# Altium footprint library MMSZ5246B-TP.PcbLib: 3 footprints
Each footprint in its own frame and in the unit in brackets; x right, y up, seen from the top. Pads: shape width x height; smd on the part's side, far side on the other; paste and mask are expansions set on the pad; w line width, h text height; cw(c..) or ccw(c..) is an arc to the next point about the centre after c.
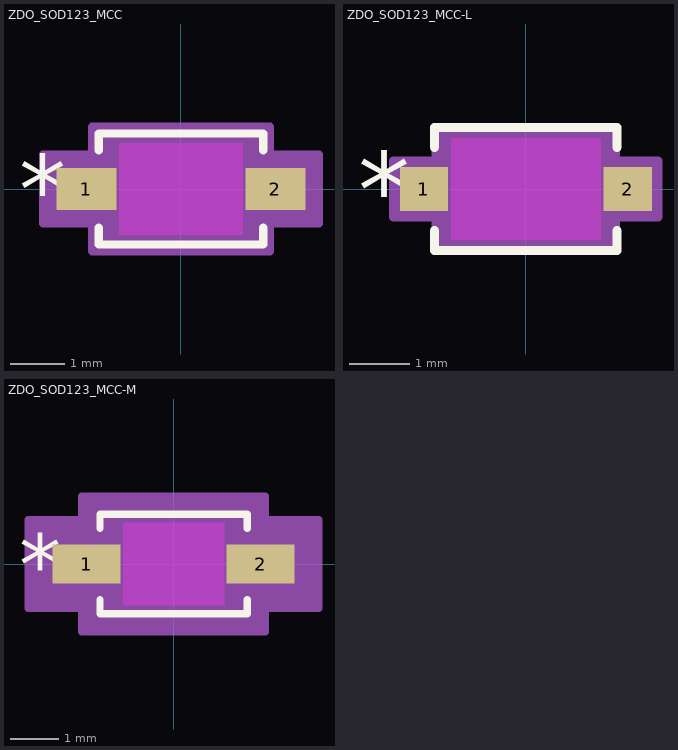
[diagram p0: the footprints below, top view; thin cyan lines are the x and y axes]

## ZDO_SOD123_MCC [mil]
pads (2):
  rect 43.56x30.36 smd paste+0 mask+0: 1(-69,0) 2(69,0)
Top Overlay:
  lines w6: -60,-28.28 -60,-40.5 60,-40.5 60,-28.28 ; -60,28.28 -60,40.5 60,40.5 60,28.28
  text ".Designator" at -137.5,-25 h50
  text "*" at -118.28,-25 h50
Keep-Out Layer:
  region: -45.22,-33.5 -45.22,33.5 45.22,33.5 45.22,-33.5
Mechanical 13:
  lines w1: -55,-17.75 -37.25,-35.5 ; -55,17.75 -37.25,35.5 ; -77,-14 -77,14 -55,14 -55,-14 -77,-14 ; -55,-35.5 55,-35.5 55,35.5 -55,35.5 -55,-35.5 ; 55,-14 55,14 77,14 77,-14 55,-14
  text "*" at -57.5,-25 h50
  text ".Designator" at -137.5,-25 h50
Mechanical 15:
  region: -65,-25.18 -100.78,-25.18 -100.78,25.18 -65,25.18 -65,45.5 65,45.5 65,25.18 100.78,25.18 100.78,-25.18 65,-25.18 65,-45.5 -65,-45.5
  lines w6: -100.78,-25.18 -100.78,25.18 -65,25.18 -65,45.5 65,45.5 65,25.18 100.78,25.18 100.78,-25.18 65,-25.18 65,-45.5 -65,-45.5 -65,-25.18 -100.78,-25.18
3D body "ZDO_SOD123_MCC.step": height 53.11, standoff 0, extent -77.01,-35.51 77.01,35.51

## ZDO_SOD123_MCC-L [mil]
pads (2):
  rect 31.75x28.79 smd paste+0 mask+0: 1(-67.03,0) 2(67.03,0)
Top Overlay:
  lines w6: -60,-27.49 -60,-40.5 60,-40.5 60,-27.49 ; -60,27.49 -60,40.5 60,40.5 60,27.49
  text ".Designator" at -137.5,-25 h50
  text "*" at -110.41,-25 h50
Keep-Out Layer:
  region: -49.16,-33.5 -49.16,33.5 49.16,33.5 49.16,-33.5
Mechanical 13:
  lines w1: -55,-17.75 -37.25,-35.5 ; -55,17.75 -37.25,35.5 ; -77,-14 -77,14 -55,14 -55,-14 -77,-14 ; -55,-35.5 55,-35.5 55,35.5 -55,35.5 -55,-35.5 ; 55,-14 55,14 77,14 77,-14 55,-14
  text "*" at -57.5,-25 h50
  text ".Designator" at -137.5,-25 h50
Mechanical 15:
  region: -59,-18.39 -86.91,-18.39 -86.91,18.39 -59,18.39 -59,39.5 59,39.5 59,18.39 86.91,18.39 86.91,-18.39 59,-18.39 59,-39.5 -59,-39.5
  lines w6: -86.91,-18.39 -86.91,18.39 -59,18.39 -59,39.5 59,39.5 59,18.39 86.91,18.39 86.91,-18.39 59,-18.39 59,-39.5 -59,-39.5 -59,-18.39 -86.91,-18.39
3D body "ZDO_SOD123_MCC.step": height 53.11, standoff 0, extent -77.01,-35.51 77.01,35.51

## ZDO_SOD123_MCC-M [mil]
pads (2):
  rect 55.37x31.94 smd paste+0 mask+0: 1(-70.97,0) 2(70.97,0)
Top Overlay:
  lines w6: -60,-29.07 -60,-40.5 60,-40.5 60,-29.07 ; -60,29.07 -60,40.5 60,40.5 60,29.07
  text ".Designator" at -137.5,-25 h50
  text "*" at -126.15,-25 h50
Keep-Out Layer:
  region: -41.28,-33.5 -41.28,33.5 41.28,33.5 41.28,-33.5
Mechanical 13:
  lines w1: -55,-17.75 -37.25,-35.5 ; -55,17.75 -37.25,35.5 ; -77,-14 -77,14 -55,14 -55,-14 -77,-14 ; -55,-35.5 55,-35.5 55,35.5 -55,35.5 -55,-35.5 ; 55,-14 55,14 77,14 77,-14 55,-14
  text "*" at -57.5,-25 h50
  text ".Designator" at -137.5,-25 h50
Mechanical 15:
  region: -75,-35.97 -118.65,-35.97 -118.65,35.97 -75,35.97 -75,55.5 75,55.5 75,35.97 118.65,35.97 118.65,-35.97 75,-35.97 75,-55.5 -75,-55.5
  lines w6: -118.65,-35.97 -118.65,35.97 -75,35.97 -75,55.5 75,55.5 75,35.97 118.65,35.97 118.65,-35.97 75,-35.97 75,-55.5 -75,-55.5 -75,-35.97 -118.65,-35.97
3D body "ZDO_SOD123_MCC.step": height 53.11, standoff 0, extent -77.01,-35.51 77.01,35.51